# Altium schematic symbol library UCP.SchLib: 378 symbols (part 9 of 14)
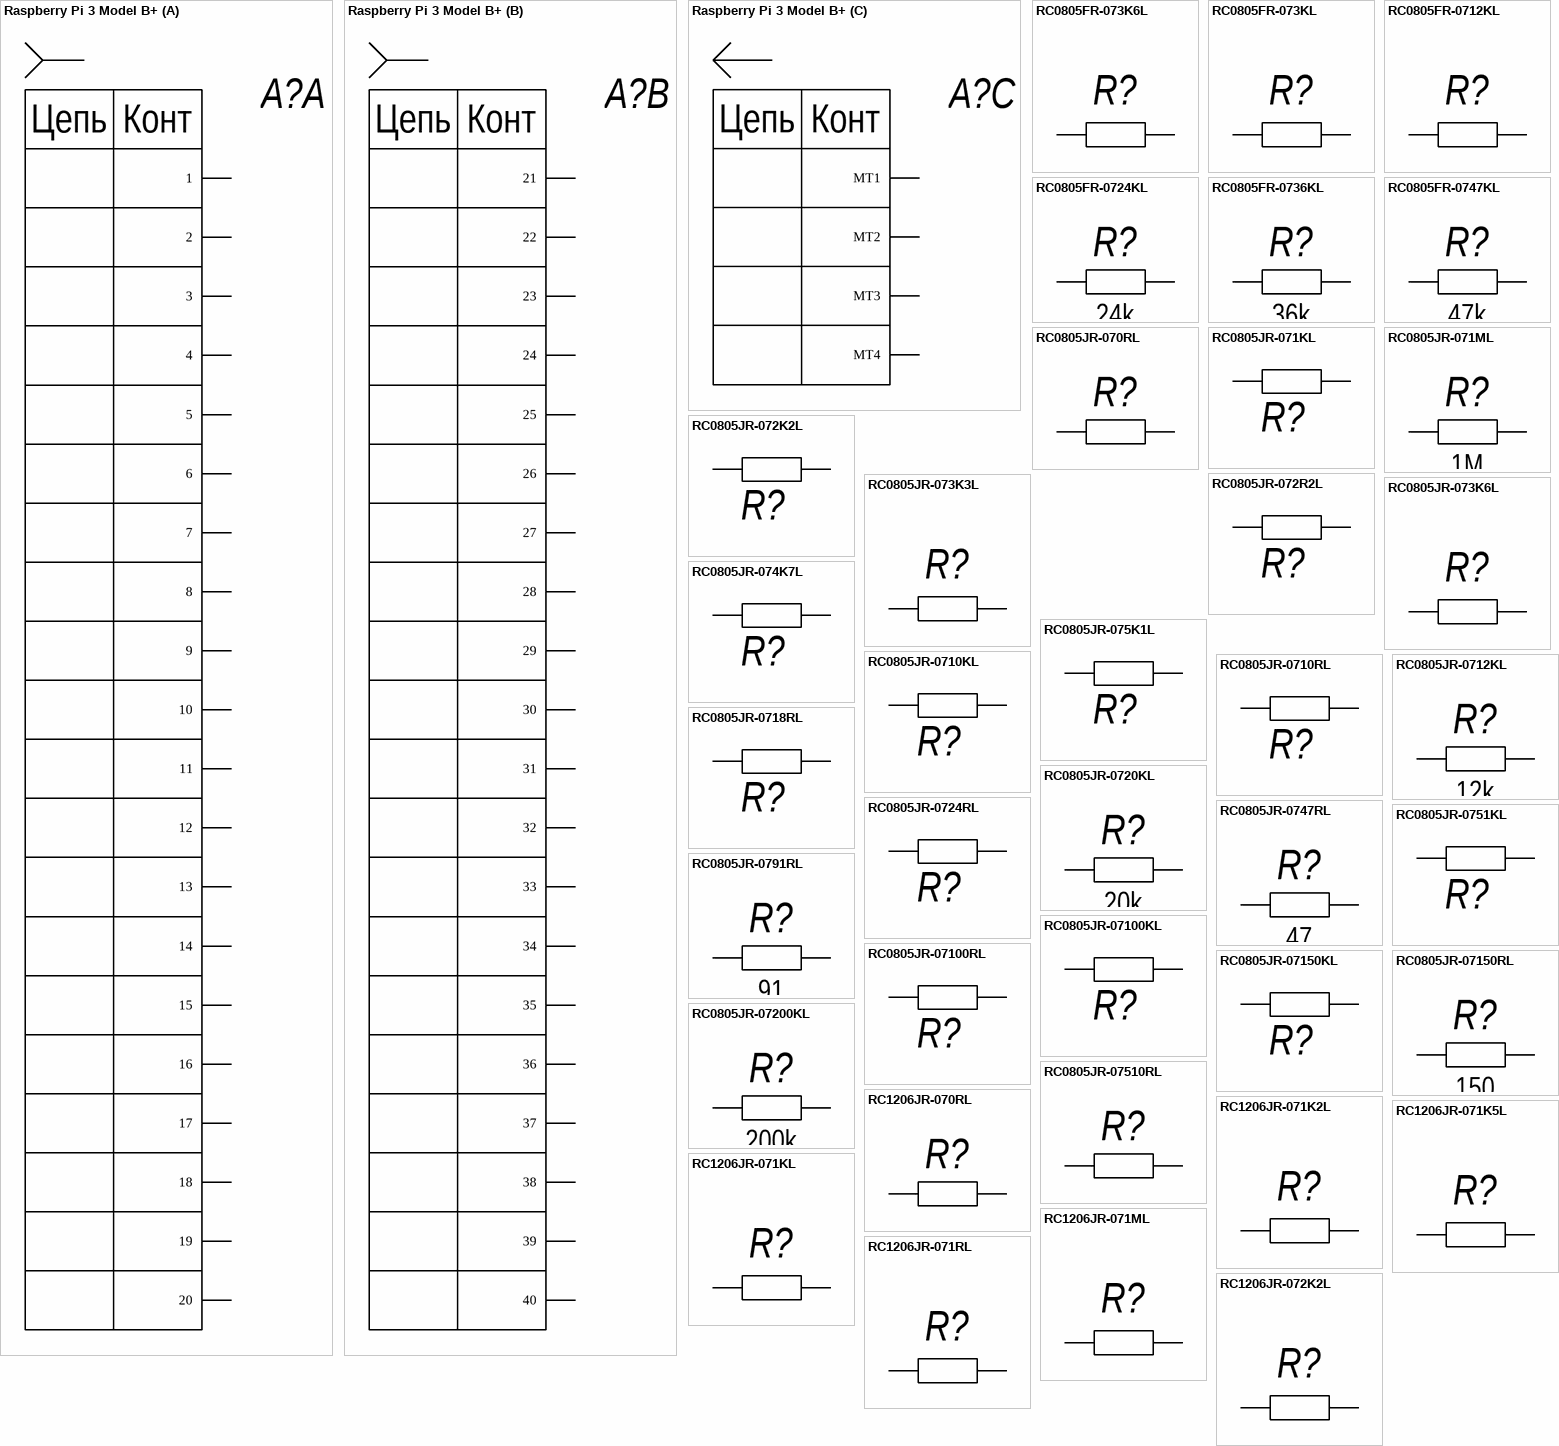
[diagram p32: symbols Raspberry Pi 3 Model B+ to RC1206JR-072K2L]

## RC0805JR-073K6L
designator R?  (value not drawn)
Chip Resistor Surface Mount 0805 3.6 кОм; Resistance: 3.3kR; Tolerance: 5%; Voltage Rating: 200V; Value: 3k6; Case/Package: 0805; Resistance Tolerance: 5%; ComponentLink1URL: https://datasheet.ciiva.com/29181/402605-da-01-en-smd-widerstand-chip1206-3-3-kohm-29181477.pdf?src-supplier=Conrad; ComponentLink1Description: https://datasheet.ciiva.com/29181/402605-da-01-en-smd-widerstand-chip1206-3-3-kohm-29181477.pdf?src-supplier=Conrad; ComponentLink2URL: https://datasheet.ciiva.com/2458/pyu-r-int-thick-7-2458662.pdf?src-supplier=Digi-Key; ComponentLink2Description: https://datasheet.ciiva.com/2458/pyu-r-int-thick-7-2458662.pdf?src-supplier=Digi-Key; ComponentLink3URL: https://datasheet.ciiva.com/2458/pyu-r-int-thick-7-2458663.pdf?src-supplier=Digi-Key; ComponentLink3Description: https://datasheet.ciiva.com/2458/pyu-r-int-thick-7-2458663.pdf?src-supplier=Digi-Key; ComponentLink4URL: https://datasheet.ciiva.com/2458/pyu-r-int-thick-7-2458664.pdf?src-supplier=Digi-Key; ComponentLink4Description: https://datasheet.ciiva.com/2458/pyu-r-int-thick-7-2458664.pdf?src-supplier=Digi-Key; ComponentLink5URL: https://datasheet.ciiva.com/7857/444357-7857499.pdf?src-supplier=Element14; ComponentLink5Description: https://datasheet.ciiva.com/7857/444357-7857499.pdf?src-supplier=Element14; ComponentLink6URL: https://datasheet.ciiva.com/7857/444357-7857500.pdf?src-supplier=Element14; ComponentLink6Description: https://datasheet.ciiva.com/7857/444357-7857500.pdf?src-supplier=Element14; ComponentLink7URL: https://datasheet.ciiva.com/46395/444164-46395133.pdf?src-supplier=Element14; ComponentLink7Description: https://datasheet.ciiva.com/46395/444164-46395133.pdf?src-supplier=Element14; ComponentLink8URL: https://datasheet.ciiva.com/12667/rc0805-12667382.pdf?src-supplier=Mouser; ComponentLink8Description: https://datasheet.ciiva.com/12667/rc0805-12667382.pdf?src-supplier=Mouser; ComponentLink9URL: https://datasheet.ciiva.com/7941/442941-7941960.pdf?src-supplier=Element14; ComponentLink9Description: https://datasheet.ciiva.com/7941/442941-7941960.pdf?src-supplier=Element14; ComponentLink10URL: https://datasheet.ciiva.com/7941/442941-7941959.pdf?src-supplier=Element14; ComponentLink10Description: https://datasheet.ciiva.com/7941/442941-7941959.pdf?src-supplier=Element14; ComponentLink11URL: https://datasheet.ciiva.com/16944/rc0805-16944442.pdf?src-supplier=Future+Electronics; ComponentLink11Description: https://datasheet.ciiva.com/16944/rc0805-16944442.pdf?src-supplier=Future+Electronics; Mount: SMT; Type: Резистор
footprint RESC200X125X60L35 (Resistor, Chip; 2.00 mm L X 1.25 mm W X 0.60 mm H body)
pins: 1, 2

## RC0805JR-074K7L
designator R?  (value not drawn)
Chip Resistor Surface Mount 0805 4,7 кОм; Manufacturer 1: Yageo; Resistance: 4.7kR; Tolerance: 5%; Temperature Coefficient: 100ppm/°C; Power Rating: 125mW; Voltage Rating: 150V; Value: 4k7; Supplier 1: Arrow Electronics; Supplier Part Number 1: RC0805JR-074K7L; Manufacturer Part Number 1: RC0805JR-074K7L; RoHS: Yes; Category: Chip SMD Resistors; Stock 1: 13470000; Pricing 1: 5000=0,00270, 10000=0,00180 (USD); Case/Package: 0805; Contact Plating: Tin,Lead,Matte; Case Code (Imperial): 0805; Case Code (Metric): 2012; Size Code: 0805; Min Operating Temperature: -55°C; Max Operating Temperature: 155°C; Resistor Type: Thick Film; Packaging: Tape and Reel; Termination: SMD/SMT; Features: Moisture Resistant; Series: RC; Max Power Dissipation: 125mW; Number of Terminations: 2; Resistance Tolerance: 5%; Construction: Rectangular; Length: 2mm; Depth: 1.25mm; Radiation Hardening: No; REACH SVHC: Unknown; Lead Free: Lead Free; Military Standard: Not; RoHS Compliant: Yes; ComponentLink1URL: https://datasheet.ciiva.com/12667/rc0805-12667037.pdf?src-supplier=Mouser; ComponentLink1Description: https://datasheet.ciiva.com/12667/rc0805-12667037.pdf?src-supplier=Mouser; ComponentLink2URL: https://datasheet.ciiva.com/7941/442941-7941974.pdf?src-supplier=Element14; ComponentLink2Description: https://datasheet.ciiva.com/7941/442941-7941974.pdf?src-supplier=Element14; ComponentLink3URL: https://datasheet.ciiva.com/7941/442941-7941973.pdf?src-supplier=Element14; ComponentLink3Description: https://datasheet.ciiva.com/7941/442941-7941973.pdf?src-supplier=Element14; ComponentLink4URL: https://datasheet.ciiva.com/17486/rc0805-17486827.pdf?src-supplier=Future+Electronics; ComponentLink4Description: https://datasheet.ciiva.com/17486/rc0805-17486827.pdf?src-supplier=Future+Electronics; Mount: SMT; Type: Резистор
footprint RESC200X125X60L35 (Resistor, Chip; 2.00 mm L X 1.25 mm W X 0.60 mm H body)
pins: 1, 2

## RC0805JR-075K1L
designator R?  (value not drawn)
Chip Resistor Surface Mount 0805 5,1 кОм; Manufacturer 1: Yageo; Resistance: 5.1kR; Tolerance: 5%; Temperature Coefficient: 100ppm/°C; Power Rating: 125mW; Voltage Rating: 150V; Value: 5k1; Supplier 1: Newark; Supplier Part Number 1: 68R0277; Manufacturer Part Number 1: RC0805JR-075K1L; RoHS: Yes; Category: Chip SMD Resistors; Stock 1: 565; Pricing 1: 1=0,12000, 25=0,06000, 50=0,03800, 100=0,02700, 250=0,02100, 500=0,01600, 1000=0,01100, 2500=0,00900 (USD); Case/Package: 0805; Number of Pins: 2; Contact Plating: Tin,Matte,Lead; Case Code (Metric): 2012; Case Code (Imperial): 0805; Weight: 0.000194oz; Size Code: 0805; Min Operating Temperature: -55°C; Max Operating Temperature: 155°C; Resistor Type: Thick Film; Package Quantity: 1; Packaging: Tape and Reel; Number of Terminations: 2; Termination: SMD/SMT; Max Power Dissipation: 125mW; Voltage Rating (DC): 150V; Features: Moisture Resistant; Series: RC; Resistance Tolerance: 5%; Construction: Rectangular; Length: 2mm; Width: 0.049inch; Height: 0.024inch; Depth: 1.25mm; Radiation Hardening: No; REACH SVHC: No SVHC; Military Standard: Not; Lead Free: Lead Free; RoHS Compliant: Yes; ComponentLink1URL: https://datasheet.ciiva.com/2456/pyu-r-int-thick-7-2456156.pdf?src-supplier=Digi-Key; ComponentLink1Description: https://datasheet.ciiva.com/2456/pyu-r-int-thick-7-2456156.pdf?src-supplier=Digi-Key; ComponentLink2URL: https://datasheet.ciiva.com/2456/pyu-r-int-thick-7-2456155.pdf?src-supplier=Digi-Key; ComponentLink2Description: https://datasheet.ciiva.com/2456/pyu-r-int-thick-7-2456155.pdf?src-supplier=Digi-Key; ComponentLink3URL: https://datasheet.ciiva.com/15190/getdatasheetpartid-329214-15190059.pdf?src-supplier=Verical; ComponentLink3Description: https://datasheet.ciiva.com/15190/getdatasheetpartid-329214-15190059.pdf?src-supplier=Verical; ComponentLink4URL: https://datasheet.ciiva.com/2456/pyu-r-int-thick-7-2456157.pdf?src-supplier=Digi-Key; ComponentLink4Description: https://datasheet.ciiva.com/2456/pyu-r-int-thick-7-2456157.pdf?src-supplier=Digi-Key; ComponentLink5URL: https://datasheet.ciiva.com/12577/rc0805-12577711.pdf?src-supplier=Mouser; ComponentLink5Description: https://datasheet.ciiva.com/12577/rc0805-12577711.pdf?src-supplier=Mouser; Mount: SMT; Type: Резистор
footprint RESC200X125X60L35 (Resistor, Chip; 2.00 mm L X 1.25 mm W X 0.60 mm H body)
pins: 1, 2

## RC0805JR-0710KL
designator R?  (value not drawn)
Chip Resistor Surface Mount 0805 10 кОм; Manufacturer 1: Yageo; Tolerance: 5%; Resistance: 10kR; Power Rating: 125mW; Temperature Coefficient: 100ppm/°C; Voltage Rating: 150V; Value: 10k; Supplier 1: RSComponents; Supplier Part Number 1: 1995759; Manufacturer Part Number 1: RC0805JR-0710KL; RoHS: Yes; Category: Chip SMD Resistors; Stock 1: 30000; Pricing 1: 5000=0,00300 (GBP); Case/Package: 0805; Contact Plating: Tin,Matte; Case Code (Imperial): 0805; Case Code (Metric): 2012; Size Code: 0805; Min Operating Temperature: -55°C; Max Operating Temperature: 155°C; Resistor Type: Thick Film; Packaging: Tape and Reel; Termination: SMD/SMT; Features: Moisture Resistant; Series: RC; Max Power Dissipation: 125mW; Number of Terminations: 2; Resistance Tolerance: 5%; Construction: Rectangular; Length: 2mm; Width: 1.25mm; Height: 0.5mm; Depth: 1.25mm; Radiation Hardening: No; RoHS Compliant: Yes; REACH SVHC: Unknown; Military Standard: Not; Lead Free: Lead Free; ComponentLink1URL: https://datasheet.ciiva.com/7983/444164-7983765.pdf?src-supplier=Element14; ComponentLink1Description: https://datasheet.ciiva.com/7983/444164-7983765.pdf?src-supplier=Element14; ComponentLink2URL: https://datasheet.ciiva.com/7941/444164-7941870.pdf?src-supplier=Element14; ComponentLink2Description: https://datasheet.ciiva.com/7941/444164-7941870.pdf?src-supplier=Element14; ComponentLink3URL: https://datasheet.ciiva.com/7941/444164-7941871.pdf?src-supplier=Element14; ComponentLink3Description: https://datasheet.ciiva.com/7941/444164-7941871.pdf?src-supplier=Element14; Mount: SMT; Type: Резистор
footprint RESC200X125X60L35 (Resistor, Chip; 2.00 mm L X 1.25 mm W X 0.60 mm H body)
pins: 1, 2

## RC0805JR-0710RL
designator R?  (value not drawn)
Chip Resistor Surface Mount 0805 10 Ом; Manufacturer 1: Yageo; Tolerance: 5%; Resistance: 10R; Temperature Coefficient: 200ppm/°C; Voltage Rating: 150V; Power Rating: 125mW; Value: 10; Supplier 1: Arrow Electronics; Supplier Part Number 1: RC0805JR-0710RL; Manufacturer Part Number 1: RC0805JR-0710RL; RoHS: Yes; Category: Chip SMD Resistors; Stock 1: 27; Pricing 1: 1=0,07580, 10=0,05800, 25=0,05130 (USD); Case/Package: 0805; Contact Plating: Tin,Matte,Lead; Case Code (Imperial): 0805; Case Code (Metric): 2012; Size Code: 0805; Min Operating Temperature: -55°C; Max Operating Temperature: 155°C; Packaging: Tape and Reel; Resistor Type: Thick Film; Package Quantity: 1; Termination: SMD/SMT; Number of Terminations: 2; Max Power Dissipation: 125mW; Features: Moisture Resistant; Series: RC; Resistance Tolerance: 5%; Length: 0.079inch; Width: 0.049inch; Height: 0.024inch; Radiation Hardening: No; REACH SVHC: Unknown; Lead Free: Lead Free; RoHS Compliant: Yes; ComponentLink1URL: https://datasheet.ciiva.com/46395/444164-46395129.pdf?src-supplier=Element14; ComponentLink1Description: https://datasheet.ciiva.com/46395/444164-46395129.pdf?src-supplier=Element14; ComponentLink2URL: https://datasheet.ciiva.com/2456/pyu-r-int-thick-7-2456041.pdf?src-supplier=Digi-Key; ComponentLink2Description: https://datasheet.ciiva.com/2456/pyu-r-int-thick-7-2456041.pdf?src-supplier=Digi-Key; ComponentLink3URL: https://datasheet.ciiva.com/2456/pyu-r-int-thick-7-2456042.pdf?src-supplier=Digi-Key; ComponentLink3Description: https://datasheet.ciiva.com/2456/pyu-r-int-thick-7-2456042.pdf?src-supplier=Digi-Key; ComponentLink4URL: https://datasheet.ciiva.com/2456/pyu-r-int-thick-7-2456040.pdf?src-supplier=Digi-Key; ComponentLink4Description: https://datasheet.ciiva.com/2456/pyu-r-int-thick-7-2456040.pdf?src-supplier=Digi-Key; ComponentLink5URL: https://datasheet.ciiva.com/12667/rc0805-12667031.pdf?src-supplier=Mouser; ComponentLink5Description: https://datasheet.ciiva.com/12667/rc0805-12667031.pdf?src-supplier=Mouser; Mount: SMT; Type: Резистор
footprint RESC200X125X60L35 (Resistor, Chip; 2.00 mm L X 1.25 mm W X 0.60 mm H body)
pins: 1, 2

## RC0805JR-0712KL
designator R?  value 12k  (hidden comment: RC0805JR-0712KL)
Chip Resistor Surface Mount 0805 12 кОм; Manufacturer 1: Yageo; Manufacturer Part Number 1: RC0805JR-0710KL; Tolerance: 5%; Resistance: 12kR; Power Rating: 125mW; Temperature Coefficient: 100ppm/°C; Voltage Rating: 150V; RoHS: Yes; Category: Chip SMD Resistors; Stock 1: 30000; Pricing 1: 5000=0,00300 (GBP); Case/Package: 0805; Contact Plating: Tin,Matte; Case Code (Imperial): 0805; Case Code (Metric): 2012; Size Code: 0805; Min Operating Temperature: -55°C; Max Operating Temperature: 155°C; Resistor Type: Thick Film; Packaging: Tape and Reel; Termination: SMD/SMT; Features: Moisture Resistant; Series: RC; Max Power Dissipation: 125mW; Number of Terminations: 2; Resistance Tolerance: 5%; Construction: Rectangular; Length: 2mm; Width: 1.25mm; Height: 0.5mm; Depth: 1.25mm; Radiation Hardening: No; RoHS Compliant: Yes; REACH SVHC: Unknown; Military Standard: Not; Lead Free: Lead Free; ComponentLink1URL: https://datasheet.ciiva.com/7983/444164-7983765.pdf?src-supplier=Element14; ComponentLink1Description: https://datasheet.ciiva.com/7983/444164-7983765.pdf?src-supplier=Element14; ComponentLink2URL: https://datasheet.ciiva.com/7941/444164-7941870.pdf?src-supplier=Element14; ComponentLink2Description: https://datasheet.ciiva.com/7941/444164-7941870.pdf?src-supplier=Element14; ComponentLink3URL: https://datasheet.ciiva.com/7941/444164-7941871.pdf?src-supplier=Element14; ComponentLink3Description: https://datasheet.ciiva.com/7941/444164-7941871.pdf?src-supplier=Element14; Manufacturer 2: Yageo; Manufacturer Part Number 2: RC0805JR-0720KL; RoHS 2: Yes; Stock 2: 6744; Pricing 2: 10=0,02900, 100=0,01300, 500=0,01100, 1000=0,00600, 2500=0,00500, 5000=0,00300, 25000=0,00290 (EUR); Number of Pins: 2; Weight: 0.000194oz; Package Quantity: 1; Voltage Rating (DC): 150V; Reach SVHC Compliant: Yes; ComponentLink4URL: https://datasheet.ciiva.com/46395/444164-46395135.pdf?src-supplier=Element14; ComponentLink4Description: https://datasheet.ciiva.com/46395/444164-46395135.pdf?src-supplier=Element14; ComponentLink5URL: https://datasheet.ciiva.com/2456/pyu-r-int-thick-7-2456304.pdf?src-supplier=Digi-Key; ComponentLink5Description: https://datasheet.ciiva.com/2456/pyu-r-int-thick-7-2456304.pdf?src-supplier=Digi-Key; ComponentLink6URL: https://datasheet.ciiva.com/2456/pyu-r-int-thick-7-2456305.pdf?src-supplier=Digi-Key; ComponentLink6Description: https://datasheet.ciiva.com/2456/pyu-r-int-thick-7-2456305.pdf?src-supplier=Digi-Key; ComponentLink7URL: https://datasheet.ciiva.com/2456/pyu-r-int-thick-7-2456303.pdf?src-supplier=Digi-Key; ComponentLink7Description: https://datasheet.ciiva.com/2456/pyu-r-int-thick-7-2456303.pdf?src-supplier=Digi-Key; ComponentLink8URL: https://datasheet.ciiva.com/12577/rc0805-12577516.pdf?src-supplier=Mouser; ComponentLink8Description: https://datasheet.ciiva.com/12577/rc0805-12577516.pdf?src-supplier=Mouser; Mount: SMT; Type: Резистор; Supplier 1: Rs; Supplier Part Number 1: 2427064
footprint RESC200X125X60L35 (Resistor, Chip; 2.00 mm L X 1.25 mm W X 0.60 mm H body)
pins: 1, 2

## RC0805JR-0718RL
designator R?  (value not drawn)
Chip Resistor Surface Mount 0805 18 Ом; Manufacturer 1: Yageo; Tolerance: 5%; Resistance: 18R; Temperature Coefficient: 100ppm/°C; Power Rating: 125mW; Voltage Rating: 150V; Value: 18; Supplier 1: Arrow Electronics; Supplier Part Number 1: RC0805JR-0718RL; Manufacturer Part Number 1: RC0805JR-0718RL; RoHS: Yes; Category: Chip SMD Resistors; Stock 1: 12330; Pricing 1: 1=0,03540, 10=0,01050, 25=0,01040, 100=0,00430, 250=0,00420, 1000=0,00230, 3000=0,00210, 6000=0,00180 (USD); Case/Package: 0805; Contact Plating: Tin,Matte,Lead; Case Code (Metric): 2012; Case Code (Imperial): 0805; Size Code: 0805; Min Operating Temperature: -55°C; Max Operating Temperature: 155°C; Resistor Type: Thick Film; Package Quantity: 1; Packaging: Tape and Reel; Number of Terminations: 2; Termination: SMD/SMT; Max Power Dissipation: 125mW; Features: Moisture Resistant; Series: RC; Construction: Rectangular; Resistance Tolerance: 5%; Length: 2mm; Width: 0.049inch; Height: 0.024inch; Depth: 1.25mm; Radiation Hardening: No; REACH SVHC: Unknown; Military Standard: Not; Lead Free: Lead Free; RoHS Compliant: Yes; ComponentLink1URL: https://datasheet.ciiva.com/2508/pyu-r-int-thick-7-2508730.pdf?src-supplier=Digi-Key; ComponentLink1Description: https://datasheet.ciiva.com/2508/pyu-r-int-thick-7-2508730.pdf?src-supplier=Digi-Key; ComponentLink2URL: https://datasheet.ciiva.com/2508/pyu-r-int-thick-7-2508731.pdf?src-supplier=Digi-Key; ComponentLink2Description: https://datasheet.ciiva.com/2508/pyu-r-int-thick-7-2508731.pdf?src-supplier=Digi-Key; ComponentLink3URL: https://datasheet.ciiva.com/2508/pyu-r-int-thick-7-2508729.pdf?src-supplier=Digi-Key; ComponentLink3Description: https://datasheet.ciiva.com/2508/pyu-r-int-thick-7-2508729.pdf?src-supplier=Digi-Key; ComponentLink4URL: https://datasheet.ciiva.com/12558/rc0805-257173-12558905.pdf?src-supplier=Mouser; ComponentLink4Description: https://datasheet.ciiva.com/12558/rc0805-257173-12558905.pdf?src-supplier=Mouser; ComponentLink5URL: https://datasheet.ciiva.com/7941/442941-7941903.pdf?src-supplier=Element14; ComponentLink5Description: https://datasheet.ciiva.com/7941/442941-7941903.pdf?src-supplier=Element14; ComponentLink6URL: https://datasheet.ciiva.com/17043/rc0805-17043703.pdf?src-supplier=Future+Electronics; ComponentLink6Description: https://datasheet.ciiva.com/17043/rc0805-17043703.pdf?src-supplier=Future+Electronics; Mount: SMT; Type: Резистор
footprint RESC200X125X60L35 (Resistor, Chip; 2.00 mm L X 1.25 mm W X 0.60 mm H body)
pins: 1, 2

## RC0805JR-0720KL
designator R?  value 20k  (hidden comment: RC0805JR-0720KL)
Chip Resistor Surface Mount 0805 20 кОм; Manufacturer 1: Yageo; Manufacturer Part Number 1: RC0805JR-0710KL; Tolerance: 5%; Resistance: 10kR; Power Rating: 125mW; Temperature Coefficient: 100ppm/°C; Voltage Rating: 150V; RoHS: Yes; Category: Chip SMD Resistors; Stock 1: 30000; Pricing 1: 5000=0,00300 (GBP); Case/Package: 0805; Contact Plating: Tin,Matte; Case Code (Imperial): 0805; Case Code (Metric): 2012; Size Code: 0805; Min Operating Temperature: -55°C; Max Operating Temperature: 155°C; Resistor Type: Thick Film; Packaging: Tape and Reel; Termination: SMD/SMT; Features: Moisture Resistant; Series: RC; Max Power Dissipation: 125mW; Number of Terminations: 2; Resistance Tolerance: 5%; Construction: Rectangular; Length: 2mm; Width: 1.25mm; Height: 0.5mm; Depth: 1.25mm; Radiation Hardening: No; RoHS Compliant: Yes; REACH SVHC: Unknown; Military Standard: Not; Lead Free: Lead Free; ComponentLink1URL: https://datasheet.ciiva.com/7983/444164-7983765.pdf?src-supplier=Element14; ComponentLink1Description: https://datasheet.ciiva.com/7983/444164-7983765.pdf?src-supplier=Element14; ComponentLink2URL: https://datasheet.ciiva.com/7941/444164-7941870.pdf?src-supplier=Element14; ComponentLink2Description: https://datasheet.ciiva.com/7941/444164-7941870.pdf?src-supplier=Element14; ComponentLink3URL: https://datasheet.ciiva.com/7941/444164-7941871.pdf?src-supplier=Element14; ComponentLink3Description: https://datasheet.ciiva.com/7941/444164-7941871.pdf?src-supplier=Element14; Manufacturer 2: Yageo; Manufacturer Part Number 2: RC0805JR-0720KL; RoHS 2: Yes; Stock 2: 6744; Pricing 2: 10=0,02900, 100=0,01300, 500=0,01100, 1000=0,00600, 2500=0,00500, 5000=0,00300, 25000=0,00290 (EUR); Number of Pins: 2; Weight: 0.000194oz; Package Quantity: 1; Voltage Rating (DC): 150V; Reach SVHC Compliant: Yes; ComponentLink4URL: https://datasheet.ciiva.com/46395/444164-46395135.pdf?src-supplier=Element14; ComponentLink4Description: https://datasheet.ciiva.com/46395/444164-46395135.pdf?src-supplier=Element14; ComponentLink5URL: https://datasheet.ciiva.com/2456/pyu-r-int-thick-7-2456304.pdf?src-supplier=Digi-Key; ComponentLink5Description: https://datasheet.ciiva.com/2456/pyu-r-int-thick-7-2456304.pdf?src-supplier=Digi-Key; ComponentLink6URL: https://datasheet.ciiva.com/2456/pyu-r-int-thick-7-2456305.pdf?src-supplier=Digi-Key; ComponentLink6Description: https://datasheet.ciiva.com/2456/pyu-r-int-thick-7-2456305.pdf?src-supplier=Digi-Key; ComponentLink7URL: https://datasheet.ciiva.com/2456/pyu-r-int-thick-7-2456303.pdf?src-supplier=Digi-Key; ComponentLink7Description: https://datasheet.ciiva.com/2456/pyu-r-int-thick-7-2456303.pdf?src-supplier=Digi-Key; ComponentLink8URL: https://datasheet.ciiva.com/12577/rc0805-12577516.pdf?src-supplier=Mouser; ComponentLink8Description: https://datasheet.ciiva.com/12577/rc0805-12577516.pdf?src-supplier=Mouser; Supplier 1: Farnell; Supplier Part Number 1: 3496111; Mount: SMT; Type: Резистор
footprint RESC200X125X60L35 (Resistor, Chip; 2.00 mm L X 1.25 mm W X 0.60 mm H body)
pins: 1, 2

## RC0805JR-0724RL
designator R?  (value not drawn)
Chip Resistor Surface Mount 0805 24 Ом; Manufacturer 1: Yageo; Resistance: 24R; Tolerance: 5%; Temperature Coefficient: 100ppm/°C; Power Rating: 125mW; Voltage Rating: 150V; Value: 24; Supplier 1: Arrow Electronics; Supplier Part Number 1: RC0805JR-0724RL; Manufacturer Part Number 1: RC0805JR-0724RL; RoHS: Yes; Category: Chip SMD Resistors; Stock 1: 375; Pricing 1: 1=0,06100, 10=0,03050, 25=0,03020, 100=0,01240, 250=0,01230 (USD); Case/Package: 0805; Contact Plating: Tin,Matte,Lead; Case Code (Metric): 2012; Case Code (Imperial): 0805; Size Code: 0805; Min Operating Temperature: -55°C; Max Operating Temperature: 155°C; Resistor Type: Thick Film; Package Quantity: 1; Packaging: Tape and Reel; Number of Terminations: 2; Termination: SMD/SMT; Max Power Dissipation: 125mW; Voltage Rating (DC): 150V; Features: Moisture Resistant; Series: RC; Construction: Rectangular; Length: 2mm; Width: 0.049inch; Height: 0.024inch; Depth: 1.25mm; Radiation Hardening: No; Military Standard: Not; Lead Free: Lead Free; RoHS Compliant: Yes; ComponentLink1URL: https://datasheet.ciiva.com/2456/pyu-r-int-thick-7-2456171.pdf?src-supplier=Digi-Key; ComponentLink1Description: https://datasheet.ciiva.com/2456/pyu-r-int-thick-7-2456171.pdf?src-supplier=Digi-Key; ComponentLink2URL: https://datasheet.ciiva.com/2456/pyu-r-int-thick-7-2456172.pdf?src-supplier=Digi-Key; ComponentLink2Description: https://datasheet.ciiva.com/2456/pyu-r-int-thick-7-2456172.pdf?src-supplier=Digi-Key; ComponentLink3URL: https://datasheet.ciiva.com/2456/pyu-r-int-thick-7-2456170.pdf?src-supplier=Digi-Key; ComponentLink3Description: https://datasheet.ciiva.com/2456/pyu-r-int-thick-7-2456170.pdf?src-supplier=Digi-Key; ComponentLink4URL: https://datasheet.ciiva.com/16776/rc0805-16776854.pdf?src-supplier=Future+Electronics; ComponentLink4Description: https://datasheet.ciiva.com/16776/rc0805-16776854.pdf?src-supplier=Future+Electronics; Mount: SMT; Type: Резистор
footprint RESC200X125X60L35 (Resistor, Chip; 2.00 mm L X 1.25 mm W X 0.60 mm H body)
pins: 1, 2

## RC0805JR-0747RL
designator R?  value 47  (hidden comment: RC0805JR-0747RL)
Chip Resistor Surface Mount 0805 47 Ом; Manufacturer 1: Yageo; Manufacturer Part Number 1: RC0805JR-0718RL; Tolerance: 5%; Resistance: 47R; Temperature Coefficient: 100ppm/°C; Power Rating: 125mW; Voltage Rating: 150V; RoHS: Yes; Category: Chip SMD Resistors; Stock 1: 12330; Pricing 1: 1=0,03540, 10=0,01050, 25=0,01040, 100=0,00430, 250=0,00420, 1000=0,00230, 3000=0,00210, 6000=0,00180 (USD); Case/Package: 0805; Contact Plating: Tin,Matte,Lead; Case Code (Metric): 2012; Case Code (Imperial): 0805; Size Code: 0805; Min Operating Temperature: -55°C; Max Operating Temperature: 155°C; Resistor Type: Thick Film; Package Quantity: 1; Packaging: Tape and Reel; Number of Terminations: 2; Termination: SMD/SMT; Max Power Dissipation: 125mW; Features: Moisture Resistant; Series: RC; Construction: Rectangular; Resistance Tolerance: 5%; Length: 2mm; Width: 0.049inch; Height: 0.024inch; Depth: 1.25mm; Radiation Hardening: No; REACH SVHC: Unknown; Military Standard: Not; Lead Free: Lead Free; RoHS Compliant: Yes; ComponentLink1URL: https://datasheet.ciiva.com/2508/pyu-r-int-thick-7-2508730.pdf?src-supplier=Digi-Key; ComponentLink1Description: https://datasheet.ciiva.com/2508/pyu-r-int-thick-7-2508730.pdf?src-supplier=Digi-Key; ComponentLink2URL: https://datasheet.ciiva.com/2508/pyu-r-int-thick-7-2508731.pdf?src-supplier=Digi-Key; ComponentLink2Description: https://datasheet.ciiva.com/2508/pyu-r-int-thick-7-2508731.pdf?src-supplier=Digi-Key; ComponentLink3URL: https://datasheet.ciiva.com/2508/pyu-r-int-thick-7-2508729.pdf?src-supplier=Digi-Key; ComponentLink3Description: https://datasheet.ciiva.com/2508/pyu-r-int-thick-7-2508729.pdf?src-supplier=Digi-Key; ComponentLink4URL: https://datasheet.ciiva.com/12558/rc0805-257173-12558905.pdf?src-supplier=Mouser; ComponentLink4Description: https://datasheet.ciiva.com/12558/rc0805-257173-12558905.pdf?src-supplier=Mouser; ComponentLink5URL: https://datasheet.ciiva.com/7941/442941-7941903.pdf?src-supplier=Element14; ComponentLink5Description: https://datasheet.ciiva.com/7941/442941-7941903.pdf?src-supplier=Element14; ComponentLink6URL: https://datasheet.ciiva.com/17043/rc0805-17043703.pdf?src-supplier=Future+Electronics; ComponentLink6Description: https://datasheet.ciiva.com/17043/rc0805-17043703.pdf?src-supplier=Future+Electronics; Mount: SMT; Type: Резистор; Supplier 1: Farnell; Supplier Part Number 1: 1799501
footprint RESC200X125X60L35 (Resistor, Chip; 2.00 mm L X 1.25 mm W X 0.60 mm H body)
pins: 1, 2

## RC0805JR-0751KL
designator R?  (value not drawn)
Chip Resistor Surface Mount 0805 51 кОм; Manufacturer 1: Yageo; Resistance: 51kR; Tolerance: 5%; Temperature Coefficient: 100ppm/°C; Power Rating: 125mW; Voltage Rating: 150V; Value: 51k; Supplier 1: Arrow Electronics; Supplier Part Number 1: RC0805JR-0751KL; Manufacturer Part Number 1: RC0805JR-0751KL; RoHS: Yes; Category: Chip SMD Resistors; Stock 1: 150000; Pricing 1: 5000=0,00490, 10000=0,00460 (USD); Case/Package: 0805; Contact Plating: Tin,Lead,Matte; Case Code (Imperial): 0805; Case Code (Metric): 2012; Size Code: 0805; Min Operating Temperature: -55°C; Max Operating Temperature: 155°C; Resistor Type: Thick Film; Packaging: Tape and Reel; Package Quantity: 1; Termination: SMD/SMT; Number of Terminations: 2; Max Power Dissipation: 125mW; Voltage Rating (DC): 150V; Features: Moisture Resistant; Series: RC; Construction: Rectangular; Length: 2mm; Width: 0.049inch; Height: 0.024inch; Depth: 1.25mm; Radiation Hardening: No; Military Standard: Not; Lead Free: Lead Free; RoHS Compliant: Yes; ComponentLink1URL: https://datasheet.ciiva.com/2456/pyu-r-int-thick-7-2456280.pdf?src-supplier=Digi-Key; ComponentLink1Description: https://datasheet.ciiva.com/2456/pyu-r-int-thick-7-2456280.pdf?src-supplier=Digi-Key; ComponentLink2URL: https://datasheet.ciiva.com/2456/pyu-r-int-thick-7-2456281.pdf?src-supplier=Digi-Key; ComponentLink2Description: https://datasheet.ciiva.com/2456/pyu-r-int-thick-7-2456281.pdf?src-supplier=Digi-Key; ComponentLink3URL: https://datasheet.ciiva.com/2456/pyu-r-int-thick-7-2456279.pdf?src-supplier=Digi-Key; ComponentLink3Description: https://datasheet.ciiva.com/2456/pyu-r-int-thick-7-2456279.pdf?src-supplier=Digi-Key; ComponentLink4URL: https://datasheet.ciiva.com/15190/getdatasheetpartid-325287-15190058.pdf?src-supplier=Verical; ComponentLink4Description: https://datasheet.ciiva.com/15190/getdatasheetpartid-325287-15190058.pdf?src-supplier=Verical; Mount: SMT; Type: Резистор
footprint RESC200X125X60L35 (Resistor, Chip; 2.00 mm L X 1.25 mm W X 0.60 mm H body)
pins: 1, 2

## RC0805JR-0791RL
designator R?  value 91  (hidden comment: RC0805JR-0791RL)
Chip Resistor Surface Mount 0805 91 Ом; Manufacturer 1: Yageo; Tolerance: 5%; Resistance: 10R; Temperature Coefficient: 200ppm/°C; Voltage Rating: 150V; Power Rating: 125mW; Manufacturer Part Number 1: RC0805JR-0791RL; RoHS: Yes; Category: Chip SMD Resistors; Stock 1: 27; Pricing 1: 5000=0,00500 (EUR); Case/Package: 0805; Contact Plating: Tin,Matte,Lead; Case Code (Imperial): 0805; Case Code (Metric): 2012; Size Code: 0805; Min Operating Temperature: -55°C; Max Operating Temperature: 155°C; Packaging: Tape and Reel; Resistor Type: Thick Film; Package Quantity: 1; Termination: SMD/SMT; Number of Terminations: 2; Max Power Dissipation: 125mW; Features: Moisture Resistant; Series: RC; Resistance Tolerance: 5%; Length: 0.079inch; Width: 0.049inch; Height: 0.024inch; Radiation Hardening: No; REACH SVHC: Unknown; Lead Free: Lead Free; RoHS Compliant: Yes; ComponentLink1URL: https://datasheet.ciiva.com/46395/444164-46395129.pdf?src-supplier=Element14; ComponentLink1Description: https://datasheet.ciiva.com/46395/444164-46395129.pdf?src-supplier=Element14; ComponentLink2URL: https://datasheet.ciiva.com/2456/pyu-r-int-thick-7-2456041.pdf?src-supplier=Digi-Key; ComponentLink2Description: https://datasheet.ciiva.com/2456/pyu-r-int-thick-7-2456041.pdf?src-supplier=Digi-Key; ComponentLink3URL: https://datasheet.ciiva.com/2456/pyu-r-int-thick-7-2456042.pdf?src-supplier=Digi-Key; ComponentLink3Description: https://datasheet.ciiva.com/2456/pyu-r-int-thick-7-2456042.pdf?src-supplier=Digi-Key; ComponentLink4URL: https://datasheet.ciiva.com/2456/pyu-r-int-thick-7-2456040.pdf?src-supplier=Digi-Key; ComponentLink4Description: https://datasheet.ciiva.com/2456/pyu-r-int-thick-7-2456040.pdf?src-supplier=Digi-Key; ComponentLink5URL: https://datasheet.ciiva.com/12667/rc0805-12667031.pdf?src-supplier=Mouser; ComponentLink5Description: https://datasheet.ciiva.com/12667/rc0805-12667031.pdf?src-supplier=Mouser; Supplier 1: Farnell; Supplier Part Number 1: 4056827; RoHS 1: Yes; Weight: 0.000194oz; Voltage Rating (DC): 150V; Construction: Rectangular; Depth: 1.25mm; Military Standard: Not; ComponentLink6URL: https://datasheet.ciiva.com/5562/rc0805-5562847.pdf?src-supplier=Mouser; ComponentLink6Description: https://datasheet.ciiva.com/5562/rc0805-5562847.pdf?src-supplier=Mouser; ComponentLink7URL: https://datasheet.ciiva.com/16745/rc0805-16745695.pdf?src-supplier=Future+Electronics; ComponentLink7Description: https://datasheet.ciiva.com/16745/rc0805-16745695.pdf?src-supplier=Future+Electronics; Mount: SMT; Type: Резистор
footprint RESC200X125X60L35 (Resistor, Chip; 2.00 mm L X 1.25 mm W X 0.60 mm H body)
pins: 1, 2

## RC0805JR-07100KL
designator R?  (value not drawn)
Chip Resistor Surface Mount 0805 100 кОм; Manufacturer 1: Yageo; Resistance: 100kR; Tolerance: 5%; Temperature Coefficient: 100ppm/°C; Power Rating: 125mW; Voltage Rating: 150V; Value: 100k; Supplier 1: Arrow Electronics; Supplier Part Number 1: RC0805JR-07100KL; Manufacturer Part Number 1: RC0805JR-07100KL; RoHS: Yes; Category: Chip SMD Resistors; Stock 1: 22; Pricing 1: 1=0,05570, 10=0,03050 (USD); Case/Package: 0805; Contact Plating: Tin,Matte,Lead; Case Code (Imperial): 0805; Case Code (Metric): 2012; Size Code: 0805; Min Operating Temperature: -55°C; Max Operating Temperature: 155°C; Resistor Type: Thick Film; Packaging: Tape and Reel; Termination: SMD/SMT; Features: Moisture Resistant; Series: RC; Max Power Dissipation: 125mW; Number of Terminations: 2; Construction: Rectangular; Resistance Tolerance: 5%; Length: 2mm; Depth: 1.25mm; Radiation Hardening: No; REACH SVHC: Unknown; Lead Free: Lead Free; Military Standard: Not; RoHS Compliant: Yes; ComponentLink1URL: https://datasheet.ciiva.com/7941/442941-7941865.pdf?src-supplier=Element14; ComponentLink1Description: https://datasheet.ciiva.com/7941/442941-7941865.pdf?src-supplier=Element14; ComponentLink2URL: https://datasheet.ciiva.com/7941/442941-7941864.pdf?src-supplier=Element14; ComponentLink2Description: https://datasheet.ciiva.com/7941/442941-7941864.pdf?src-supplier=Element14; ComponentLink3URL: https://datasheet.ciiva.com/15190/getdatasheetpartid-479267-15190029.pdf?src-supplier=Verical; ComponentLink3Description: https://datasheet.ciiva.com/15190/getdatasheetpartid-479267-15190029.pdf?src-supplier=Verical; Mount: SMT; Type: Резистор
footprint RESC200X125X60L35 (Resistor, Chip; 2.00 mm L X 1.25 mm W X 0.60 mm H body)
pins: 1, 2

## RC0805JR-07100RL
designator R?  (value not drawn)
Chip Resistor Surface Mount 0805 100 Ом; Manufacturer 1: Yageo; Tolerance: 5%; Resistance: 100R; Temperature Coefficient: 100ppm/°C; Power Rating: 125mW; Voltage Rating: 150V; Value: 100; Supplier 1: Avnet; Supplier Part Number 1: RC0805JR-07100RL; Manufacturer Part Number 1: RC0805JR-07100RL; RoHS: Yes; Category: Chip SMD Resistors; Stock 1: 585000; Pricing 1: 5000=0,00202, 10000=0,00199, 20000=0,00193 (USD); Case/Package: 0805; Contact Plating: Tin,Matte,Lead; Case Code (Imperial): 0805; Case Code (Metric): 2012; Size Code: 0805; Min Operating Temperature: -55°C; Max Operating Temperature: 155°C; Resistor Type: Thick Film; Packaging: Tape and Reel; Termination: SMD/SMT; Features: Moisture Resistant; Series: RC; Max Power Dissipation: 125mW; Number of Terminations: 2; Resistance Tolerance: 5%; Radiation Hardening: No; REACH SVHC: Unknown; Lead Free: Lead Free; RoHS Compliant: Yes; Mount: SMT; Type: Резистор
footprint RESC200X125X60L35 (Resistor, Chip; 2.00 mm L X 1.25 mm W X 0.60 mm H body)
pins: 1, 2

## RC0805JR-07150KL
designator R?  (value not drawn)
Chip Resistor Surface Mount 0805 150 кОм; Manufacturer 1: Yageo; Resistance: 150kR; Tolerance: 5%; Temperature Coefficient: 100ppm/°C; Power Rating: 125mW; Voltage Rating: 150V; Value: 150k; Supplier 1: Arrow Electronics; Supplier Part Number 1: RC0805JR-07150KL; Manufacturer Part Number 1: RC0805JR-07150KL; RoHS: Yes; Category: Chip SMD Resistors; Stock 1: 883; Pricing 1: 1=0,05260, 10=0,02950, 25=0,01880, 100=0,00950, 250=0,00940, 500=0,00770 (USD); Case/Package: 0805; Contact Plating: Tin,Lead,Matte; Case Code (Imperial): 0805; Case Code (Metric): 2012; Weight: 0.000194oz; Size Code: 0805; Min Operating Temperature: -55°C; Max Operating Temperature: 155°C; Resistor Type: Thick Film; Packaging: Tape and Reel; Termination: SMD/SMT; Features: Moisture Resistant; Series: RC; Max Power Dissipation: 125mW; Number of Terminations: 2; Construction: Rectangular; Resistance Tolerance: 5%; Length: 2mm; Width: 1.25mm; Height: 0.5mm; Depth: 1.25mm; Radiation Hardening: No; REACH SVHC: Unknown; Military Standard: Not; Lead Free: Lead Free; RoHS Compliant: Yes; ComponentLink1URL: https://datasheet.ciiva.com/5596/rc0805-5596069.pdf?src-supplier=Mouser; ComponentLink1Description: https://datasheet.ciiva.com/5596/rc0805-5596069.pdf?src-supplier=Mouser; ComponentLink2URL: https://datasheet.ciiva.com/7941/442941-7941886.pdf?src-supplier=Element14; ComponentLink2Description: https://datasheet.ciiva.com/7941/442941-7941886.pdf?src-supplier=Element14; ComponentLink3URL: https://datasheet.ciiva.com/7941/442941-7941885.pdf?src-supplier=Element14; ComponentLink3Description: https://datasheet.ciiva.com/7941/442941-7941885.pdf?src-supplier=Element14; ComponentLink4URL: https://datasheet.ciiva.com/16777/rc0805-16777738.pdf?src-supplier=Future+Electronics; ComponentLink4Description: https://datasheet.ciiva.com/16777/rc0805-16777738.pdf?src-supplier=Future+Electronics; Mount: SMT; Type: Резистор
footprint RESC200X125X60L35 (Resistor, Chip; 2.00 mm L X 1.25 mm W X 0.60 mm H body)
pins: 1, 2

## RC0805JR-07150RL
designator R?  value 150  (hidden comment: RC0805JR-07150RL)
Res Thick Film 0805 150 Ohm 5% 0.125W(1/8W) ±100ppm/C Pad SMD T/R; Manufacturer 1: Yageo; Resistance: 150R; Temperature Coefficient: 100ppm/°C; Power Rating: 125mW; Voltage Rating: 150V; Case/Package: 0805; Max Operating Temperature: 155°C; Resistance Tolerance: 5%; Mount: SMT; Type: Резистор; Supplier 1: Farnell; Supplier Part Number 1: 9233903; Manufacturer Part Number 1: RC0805JR-07150RL; RoHS 1: Yes; Category: Chip SMD Resistors; Stock 1: 4530; Pricing 1: 10=0,03600, 100=0,01500, 500=0,01050, 1000=0,00600, 2500=0,00590 (EUR); Contact Plating: Tin,Lead; Case Code (Imperial): 0805; Case Code (Metric): 2012; Size Code: 0805; Min Operating Temperature: -55°C; Tolerance: 5%; Resistor Type: Thick Film; Packaging: Tape and Reel; Termination: SMD/SMT; Features: Moisture Resistant; Series: RC; Max Power Dissipation: 125mW; Number of Terminations: 2; Radiation Hardening: No; Lead Free: Lead Free; RoHS Compliant: Yes; ComponentLink1URL: https://datasheet.ciiva.com/46395/444164-46395142.pdf?src-supplier=Element14; ComponentLink1Description: https://datasheet.ciiva.com/46395/444164-46395142.pdf?src-supplier=Element14; ComponentLink2URL: https://datasheet.ciiva.com/7941/442941-7941887.pdf?src-supplier=Element14; ComponentLink2Description: https://datasheet.ciiva.com/7941/442941-7941887.pdf?src-supplier=Element14
footprint RESC200X125X60L35 (Resistor, Chip; 2.00 mm L X 1.25 mm W X 0.60 mm H body)
pins: 1, 2

## RC0805JR-07200KL
designator R?  value 200k  (hidden comment: RC0805JR-07200KL)
Chip Resistor Surface Mount 0805 200 кОм; Manufacturer 1: Yageo; Manufacturer Part Number 1: RC0805JR-07100KL; Resistance: 100kR; Tolerance: 5%; Temperature Coefficient: 100ppm/°C; Power Rating: 125mW; Voltage Rating: 150V; Supplier 1: Arrow Electronics; Supplier Part Number 1: RC0805JR-07100KL; RoHS: Yes; Category: Chip SMD Resistors; Stock 1: 22; Pricing 1: 1=0,05570, 10=0,03050 (USD); Case/Package: 0805; Contact Plating: Tin,Matte,Lead; Case Code (Imperial): 0805; Case Code (Metric): 2012; Size Code: 0805; Min Operating Temperature: -55°C; Max Operating Temperature: 155°C; Resistor Type: Thick Film; Packaging: Tape and Reel; Termination: SMD/SMT; Features: Moisture Resistant; Series: RC; Max Power Dissipation: 125mW; Number of Terminations: 2; Construction: Rectangular; Resistance Tolerance: 5%; Length: 2mm; Depth: 1.25mm; Radiation Hardening: No; REACH SVHC: Unknown; Lead Free: Lead Free; Military Standard: Not; RoHS Compliant: Yes; ComponentLink1URL: https://datasheet.ciiva.com/7941/442941-7941865.pdf?src-supplier=Element14; ComponentLink1Description: https://datasheet.ciiva.com/7941/442941-7941865.pdf?src-supplier=Element14; ComponentLink2URL: https://datasheet.ciiva.com/7941/442941-7941864.pdf?src-supplier=Element14; ComponentLink2Description: https://datasheet.ciiva.com/7941/442941-7941864.pdf?src-supplier=Element14; ComponentLink3URL: https://datasheet.ciiva.com/15190/getdatasheetpartid-479267-15190029.pdf?src-supplier=Verical; ComponentLink3Description: https://datasheet.ciiva.com/15190/getdatasheetpartid-479267-15190029.pdf?src-supplier=Verical; Supplier 2: Farnell; Supplier Part Number 2: 3496109; Manufacturer 2: Yageo; Manufacturer Part Number 2: RC0805JR-07200KL; RoHS 2: Yes; Stock 2: 19240; Pricing 2: 10=0,02900, 100=0,01200, 500=0,01100, 1000=0,00600, 2500=0,00500, 5000=0,00400, 25000=0,00390 (EUR); Package Quantity: 1; Voltage Rating (DC): 150V; Working Voltage: 150V; Technology: THICK FILM; Width: 0.049inch; Height: 0.024inch; ComponentLink4URL: https://datasheet.ciiva.com/2508/pyu-r-int-thick-7-2508736.pdf?src-supplier=Digi-Key; ComponentLink4Description: https://datasheet.ciiva.com/2508/pyu-r-int-thick-7-2508736.pdf?src-supplier=Digi-Key; ComponentLink5URL: https://datasheet.ciiva.com/2508/pyu-r-int-thick-7-2508737.pdf?src-supplier=Digi-Key; ComponentLink5Description: https://datasheet.ciiva.com/2508/pyu-r-int-thick-7-2508737.pdf?src-supplier=Digi-Key; ComponentLink6URL: https://datasheet.ciiva.com/2508/pyu-r-int-thick-7-2508735.pdf?src-supplier=Digi-Key; ComponentLink6Description: https://datasheet.ciiva.com/2508/pyu-r-int-thick-7-2508735.pdf?src-supplier=Digi-Key; ComponentLink7URL: https://datasheet.ciiva.com/16741/rc0805-16741414.pdf?src-supplier=Future+Electronics; ComponentLink7Description: https://datasheet.ciiva.com/16741/rc0805-16741414.pdf?src-supplier=Future+Electronics; Mount: SMT; Type: Резистор
footprint RESC200X125X60L35 (Resistor, Chip; 2.00 mm L X 1.25 mm W X 0.60 mm H body)
pins: 1, 2

## RC0805JR-07510RL
designator R?  (value not drawn)
Chip Resistor Surface Mount 0805 510 Ом; Manufacturer 1: Yageo; Resistance: 510R; Tolerance: 5%; Temperature Coefficient: 100ppm/°C; Power Rating: 125mW; Voltage Rating: 150V; Voltage Rating (DC): 300V; Value: 510; ComponentLink1URL: https://datasheet.ciiva.com/7941/1738694-7941861.pdf?src-supplier=Element14; ComponentLink1Description: https://datasheet.ciiva.com/7941/1738694-7941861.pdf?src-supplier=Element14; ComponentLink2URL: https://datasheet.ciiva.com/11819/0900766b8106beab-11819430.pdf?src-supplier=RSComponents; ComponentLink2Description: https://datasheet.ciiva.com/11819/0900766b8106beab-11819430.pdf?src-supplier=RSComponents; ComponentLink3URL: https://datasheet.ciiva.com/7941/1738694-7941862.pdf?src-supplier=Element14; ComponentLink3Description: https://datasheet.ciiva.com/7941/1738694-7941862.pdf?src-supplier=Element14; ComponentLink4URL: https://datasheet.ciiva.com/7941/1738694-7941863.pdf?src-supplier=Element14; ComponentLink4Description: https://datasheet.ciiva.com/7941/1738694-7941863.pdf?src-supplier=Element14; ComponentLink5URL: https://datasheet.ciiva.com/15190/getdatasheetpartid-330685-15190028.pdf?src-supplier=Verical; ComponentLink5Description: https://datasheet.ciiva.com/15190/getdatasheetpartid-330685-15190028.pdf?src-supplier=Verical; Supplier 1: Digi-Key; Supplier Part Number 1: 311-510ARCT-ND; Manufacturer Part Number 1: RC0805JR-07510RL; RoHS: Yes; Category: Chip SMD Resistors; Stock 1: 281441; Pricing 1: 1=0,10000, 10=0,03600, 100=0,01450, 1000=0,00652, 2500=0,00566 (USD); Case/Package: 0805; Contact Plating: Tin,Matte,Lead; Case Code (Metric): 2012; Case Code (Imperial): 0805; Min Operating Temperature: -55°C; Max Operating Temperature: 155°C; Resistor Type: Thick Film; Packaging: Tape and Reel; Package Quantity: 1; Number of Terminations: 2; Termination: SMD/SMT; Max Power Dissipation: 125mW; Working Voltage: 150V; Features: Moisture Resistant; Series: RC; Technology: THICK FILM; Construction: Rectangular; Length: 2mm; Width: 0.049inch; Height: 0.024inch; Depth: 1.25mm; Radiation Hardening: No; Military Standard: Not; Lead Free: Lead Free; RoHS Compliant: Yes; ComponentLink6URL: https://datasheet.ciiva.com/2519/pyu-r-int-thick-7-2519248.pdf?src-supplier=Digi-Key; ComponentLink6Description: https://datasheet.ciiva.com/2519/pyu-r-int-thick-7-2519248.pdf?src-supplier=Digi-Key; ComponentLink7URL: https://datasheet.ciiva.com/16741/rc0805-16741256.pdf?src-supplier=Future+Electronics; ComponentLink7Description: https://datasheet.ciiva.com/16741/rc0805-16741256.pdf?src-supplier=Future+Electronics; ComponentLink8URL: https://datasheet.ciiva.com/12656/rc0805-12656876.pdf?src-supplier=Mouser; ComponentLink8Description: https://datasheet.ciiva.com/12656/rc0805-12656876.pdf?src-supplier=Mouser; ComponentLink9URL: https://datasheet.ciiva.com/2519/pyu-r-int-thick-7-2519246.pdf?src-supplier=Digi-Key; ComponentLink9Description: https://datasheet.ciiva.com/2519/pyu-r-int-thick-7-2519246.pdf?src-supplier=Digi-Key; ComponentLink10URL: https://datasheet.ciiva.com/2519/pyu-r-int-thick-7-2519247.pdf?src-supplier=Digi-Key; ComponentLink10Description: https://datasheet.ciiva.com/2519/pyu-r-int-thick-7-2519247.pdf?src-supplier=Digi-Key; Mount: SMT; Type: Резистор
footprint RESC200X125X60L35 (Resistor, Chip; 2.00 mm L X 1.25 mm W X 0.60 mm H body)
pins: 1, 2

## RC1206JR-070RL
designator R?  (value not drawn)
Chip Resistor Surface Mount 1206 0 Ом; Manufacturer 1: Yageo; Resistance: 0mR; Tolerance: 5%; Power Rating: 250mW; Voltage Rating: 200V; Temperature Coefficient: 200ppm/°C; Value: 0; Supplier 1: Digi-Key; Supplier Part Number 1: 311-0.0ERCT-ND; Manufacturer Part Number 1: RC1206JR-070RL; RoHS: Yes; Category: Chip SMD Resistors; Stock 1: 4588892; Pricing 1: 1=0,10000, 10=0,05500, 25=0,04000, 50=0,03040, 100=0,02240, 250=0,01712, 500=0,01368, 1000=0,01007 (USD); Case/Package: 1206; Contact Plating: Tin,Matte; Case Code (Metric): 3216; Case Code (Imperial): 1206; Size Code: 1206; Min Operating Temperature: -55°C; Max Operating Temperature: 155°C; Resistor Type: Thick Film,Carbon Film; Packaging: Tape and Reel; Package Quantity: 5000; Number of Terminations: 2; Termination: SMD/SMT; Max Power Dissipation: 250mW; Series: RC1206; Resistance Tolerance: 5%; Construction: Rectangular; Technology: THICK FILM; Length: 3.1mm; Width: 0.063inch; Height: 0.026inch; Depth: 1.6mm; Radiation Hardening: No; REACH SVHC: Unknown; Military Standard: Not; Lead Free: Lead Free; RoHS Compliant: Yes; ComponentLink1URL: https://datasheet.ciiva.com/11808/0900766b80c6630a-11808156.pdf?src-supplier=RSComponents; ComponentLink1Description: https://datasheet.ciiva.com/11808/0900766b80c6630a-11808156.pdf?src-supplier=RSComponents; ComponentLink2URL: https://datasheet.ciiva.com/29181/402222-da-01-en-smd-widerstand-0-ohm-1206-29181568.pdf?src-supplier=Conrad; ComponentLink2Description: https://datasheet.ciiva.com/29181/402222-da-01-en-smd-widerstand-0-ohm-1206-29181568.pdf?src-supplier=Conrad; ComponentLink3URL: https://datasheet.ciiva.com/22747/1692832-22747541.pdf?src-supplier=Element14; ComponentLink3Description: https://datasheet.ciiva.com/22747/1692832-22747541.pdf?src-supplier=Element14; ComponentLink4URL: https://datasheet.ciiva.com/46445/444357-46445719.pdf?src-supplier=Element14; ComponentLink4Description: https://datasheet.ciiva.com/46445/444357-46445719.pdf?src-supplier=Element14; ComponentLink5URL: https://datasheet.ciiva.com/17035/pyu-rc1206-51-rohs-l-4-17035512.pdf?src-supplier=Future+Electronics; ComponentLink5Description: https://datasheet.ciiva.com/17035/pyu-rc1206-51-rohs-l-4-17035512.pdf?src-supplier=Future+Electronics; ComponentLink6URL: https://datasheet.ciiva.com/2458/pyu-rc1206-51-rohs-l-4-2458668.pdf?src-supplier=Digi-Key; ComponentLink6Description: https://datasheet.ciiva.com/2458/pyu-rc1206-51-rohs-l-4-2458668.pdf?src-supplier=Digi-Key; ComponentLink7URL: https://datasheet.ciiva.com/2458/pyu-rc1206-51-rohs-l-4-2458669.pdf?src-supplier=Digi-Key; ComponentLink7Description: https://datasheet.ciiva.com/2458/pyu-rc1206-51-rohs-l-4-2458669.pdf?src-supplier=Digi-Key; ComponentLink8URL: https://datasheet.ciiva.com/7857/1692832-7857421.pdf?src-supplier=Element14; ComponentLink8Description: https://datasheet.ciiva.com/7857/1692832-7857421.pdf?src-supplier=Element14; ComponentLink9URL: https://datasheet.ciiva.com/2458/pyu-rc1206-51-rohs-l-4-2458670.pdf?src-supplier=Digi-Key; ComponentLink9Description: https://datasheet.ciiva.com/2458/pyu-rc1206-51-rohs-l-4-2458670.pdf?src-supplier=Digi-Key; ComponentLink10URL: https://datasheet.ciiva.com/7857/1692832-7857422.pdf?src-supplier=Element14; ComponentLink10Description: https://datasheet.ciiva.com/7857/1692832-7857422.pdf?src-supplier=Element14; ComponentLink11URL: https://datasheet.ciiva.com/7983/444357-7983807.pdf?src-supplier=Element14; ComponentLink11Description: https://datasheet.ciiva.com/7983/444357-7983807.pdf?src-supplier=Element14; Mount: SMT; Type: Резистор
footprint RESC310X160X65L40N (Resistor, Chip; 3.10 mm L X 1.60 mm W X 0.65 mm H body)
pins: 1, 2

## RC1206JR-071K2L
designator R?  (value not drawn)
Chip Resistor Surface Mount 1206 1,2 кОм; Manufacturer 1: Yageo; Manufacturer Part Number 1: RC1206JR-071K5L; Power Rating: 250mW; Tolerance: 5%; Resistance: 1.5kR; Voltage Rating: 200V; Temperature Coefficient: 100ppm/°C; Value: 1k2; RoHS: Yes; Category: Chip SMD Resistors; Stock 1: 19121; Pricing 1: 1=0,10000, 10=0,06300, 100=0,02580, 1000=0,01158, 2500=0,01005 (USD); Case/Package: 1206; Case Code (Imperial): 1206; Case Code (Metric): 3216; Size Code: 1206; Min Operating Temperature: -55°C; Max Operating Temperature: 155°C; Resistor Type: Thick Film; Packaging: Tape and Reel; Package Quantity: 1; Termination: SMD/SMT; Number of Terminations: 2; Max Power Dissipation: 250mW; Features: Moisture Resistant; Series: RC; Construction: Rectangular; Resistance Tolerance: 5%; Length: 3.1mm; Width: 1.6mm; Height: 0.026inch; Depth: 1.6mm; REACH SVHC: No SVHC; Military Standard: Not; Lead Free: Lead Free; RoHS Compliant: Yes; ComponentLink1URL: https://datasheet.ciiva.com/29181/402567-da-01-en-smd-widerstand-chip1206-1-5-kohm-29181470.pdf?src-supplier=Conrad; ComponentLink1Description: https://datasheet.ciiva.com/29181/402567-da-01-en-smd-widerstand-chip1206-1-5-kohm-29181470.pdf?src-supplier=Conrad; ComponentLink2URL: https://datasheet.ciiva.com/2458/pyu-r-int-thick-7-2458683.pdf?src-supplier=Digi-Key; ComponentLink2Description: https://datasheet.ciiva.com/2458/pyu-r-int-thick-7-2458683.pdf?src-supplier=Digi-Key; ComponentLink3URL: https://datasheet.ciiva.com/2458/pyu-r-int-thick-7-2458685.pdf?src-supplier=Digi-Key; ComponentLink3Description: https://datasheet.ciiva.com/2458/pyu-r-int-thick-7-2458685.pdf?src-supplier=Digi-Key; ComponentLink4URL: https://datasheet.ciiva.com/7857/444357-7857455.pdf?src-supplier=Element14; ComponentLink4Description: https://datasheet.ciiva.com/7857/444357-7857455.pdf?src-supplier=Element14; ComponentLink5URL: https://datasheet.ciiva.com/2458/pyu-r-int-thick-7-2458684.pdf?src-supplier=Digi-Key; ComponentLink5Description: https://datasheet.ciiva.com/2458/pyu-r-int-thick-7-2458684.pdf?src-supplier=Digi-Key; Supplier 1: Newark; Supplier Part Number 1: 68R0299; Mount: SMT; Type: Резистор
footprint RESC310X160X65L40N (Resistor, Chip; 3.10 mm L X 1.60 mm W X 0.65 mm H body)
pins: 1, 2